# Altium footprint library USB.PcbLib: 25 footprints (part 1 of 2)
Each footprint in its own frame and in the unit in brackets; x right, y up, seen from the top. Pads: shape width x height; smd on the part's side, far side on the other; paste and mask are expansions set on the pad; w line width, h text height; cw(c..) or ccw(c..) is an arc to the next point about the centre after c.
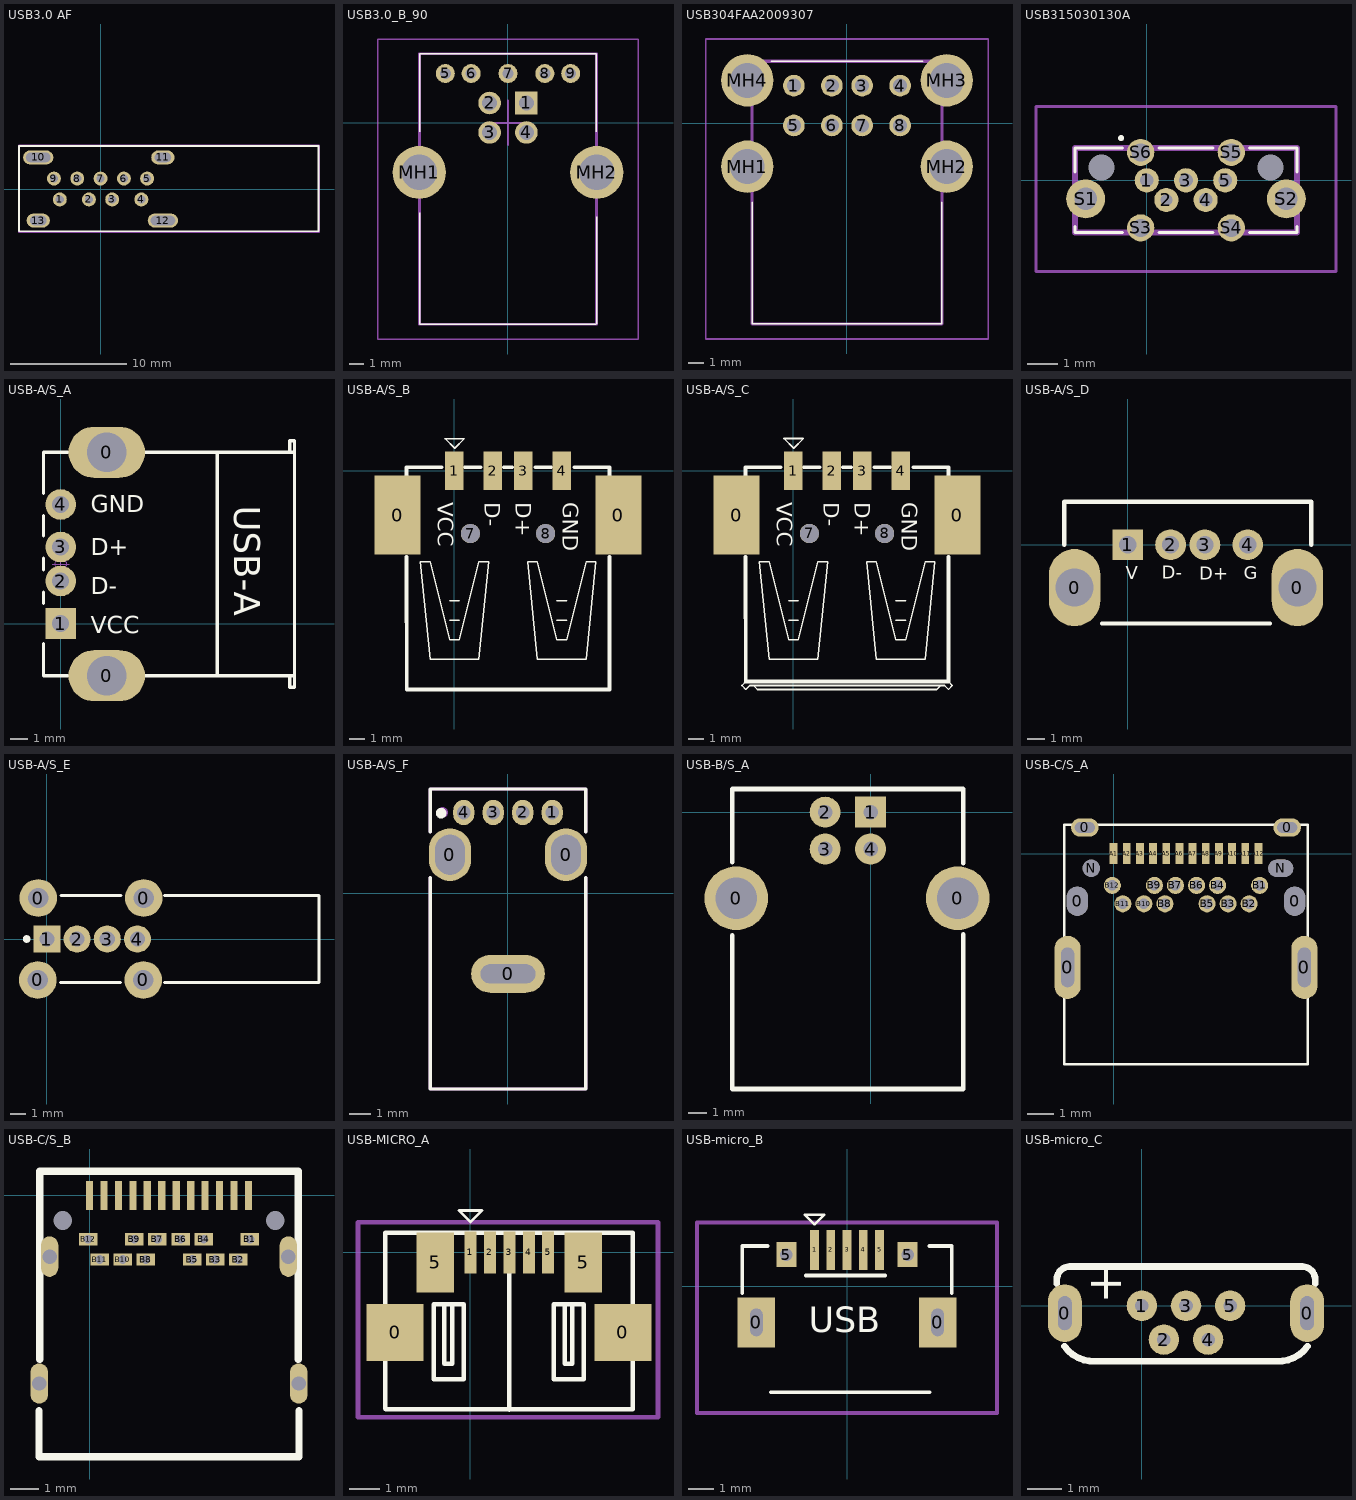
[diagram p0: the footprints below, top view; thin cyan lines are the x and y axes]

## USB3.0 AF [mm]
pads (13):
  round 1.2 hole 0.7: 1(-3.5,-0.9) 2(-1,-0.9) 3(1,-0.9) 4(3.5,-0.9) 5(4,0.9) 6(2,0.9) 7(0,0.9) 8(-2,0.9) 9(-4,0.9)
  oval 2.6x1.2 hole 0.8 slot 2.1 at 0 deg: 10(-5.35,2.71) 12(5.35,-2.71)
  oval 2x1.2 hole 0.8 slot 1.4 at 0 deg: 11(5.35,2.71) 13(-5.35,-2.71)
Top Overlay:
  lines w0.152: -7,-3.62 -7,3.7 18.7,3.7 18.7,-3.62 -7,-3.62
Top Designator (Mech15):
  lines w0.152: -7,-3.683 -7,3.75 18.75,3.75 18.75,-3.683 -7,-3.683
  text "'.Designator'" at -3.683,-0.508 h1.52
3D body "usb_3_a_90_v.stp": height 14, standoff -4.21, extent -7.05,-3.62 18.65,3.7

## USB3.0_B_90 [mm] "USB3.0 B型母座 蓝色 铜壳 弯脚 90度"
pads (11):
  rect 1.53x1.53 hole 1.02: 1(1.25,1.355)
  round 1.53 hole 1.02: 2(-1.25,1.355) 3(-1.25,-0.645) 4(1.25,-0.645)
  round 1.286 hole 0.75: 5(-4.25,3.355) 6(-2.5,3.355) 7(0,3.355) 8(2.5,3.355) 9(4.25,3.355)
  round 3.6 hole 2.4: MH1(-6.02,-3.355) MH2(6.02,-3.355)
Top Overlay:
  lines w0.1: -6,-13.655 6,-13.655 -6,-13.655 ; -6,-13.655 -6,-6.105 -6,-13.655 ; -6,4.695 -6,-0.605 -6,4.695 ; -6,4.695 6,4.695 ; -6,4.695 6,4.695 ; 6,4.695 6,-0.605 6,4.695 ; 6.02,-13.605 6.02,-6.355 6.02,-13.605
Top Component Outline:
  lines w0.2: -6,-13.655 6,-13.655 6,4.695 -6,4.695 -6,-13.655
Top Component Center:
  lines w0.152: -1.5,0 1.5,0 ; 0,-1.5 0,1.5
Top Value:
  text "'.Comment'" at -4.385,-0.591 h2.03
Top Designator:
  text "'.Designator'" at -5.815,-0.425 h2.03
Bottom Courtyard:
  lines w0.1: -8.82,-14.655 8.82,-14.655 8.82,5.695 -8.82,5.695 -8.82,-14.655
3D body "USB3.0-typeB.STEP": height 13.06, standoff -3.92, extent -6.35,-13.62 6.25,4.73

## USB304FAA2009307 [mm]
pads (12):
  round 1.431 hole 0.92: 1(-3.5,2.49) 2(-1,2.49) 3(1,2.49) 4(3.5,2.49) 5(-3.5,-0.13) 6(-1,-0.13) 7(1,-0.13) 8(3.5,-0.13)
  round 3.45 hole 2.3: MH1(-6.57,-2.84) MH2(6.57,-2.84) MH3(6.57,2.84) MH4(-6.57,2.84)
Top Overlay:
  lines w0.1: -6.25,-5.2 -6.25,-13.2 6.25,-13.2 6.25,-5.2 ; -5,4.1 5,4.1
Body Extra:
  lines w0.2: -6.25,-13.2 6.25,-13.2 6.25,4.1 -6.25,4.1 -6.25,-13.2
Top Designator (Mech15):
  lines w0.1: -9.295,-14.2 9.295,-14.2 9.295,5.565 -9.295,5.565 -9.295,-14.2
  text "'.Designator'" at -4.5,-4.5 h1.52
3D body "USB AF 双层 DIP.stp": height 15.6, standoff -3.8, extent -7.906,-13.602 7.794,3.996

## USB315030130A [mm]
pads (13):
  round 0.8 hole 0.45: 1(0,0) 3(1.3,0) 4(1.95,-0.65) 5(2.6,0)
  round 0.8 hole 0.4: 2(0.65,-0.65)
  round 0.425 hole 0.85 unplated: MH1(-1.5,0.425) MH2(4.1,0.425)
  round 1.286 hole 0.75: S1(-2.025,-0.615) S2(4.625,-0.615)
  round 0.9 hole 0.6: S3(-0.2,-1.575) S4(2.8,-1.575) S5(2.8,0.925) S6(-0.2,0.925)
Top Overlay:
  lines w0.1: -2.375,-1.525 -2.375,-1.725 -0.8,-1.725 ; -2.375,0.275 -2.375,1.075 -0.8,1.075 ; 0.4,-1.725 2.2,-1.725 ; 0.4,1.075 2.2,1.075 ; 3.4,-1.725 4.975,-1.725 4.975,-1.525 ; 3.4,1.075 4.975,1.075 4.975,0.275 ; -0.9,1.4 ccw(c-0.85,1.4) -0.8,1.4 ccw(c-0.85,1.4) -0.9,1.4
Body Extra:
  lines w0.2: -2.375,-1.725 -2.375,1.075 4.975,1.075 4.975,-1.725 -2.375,-1.725
Top Designator (Mech15):
  lines w0.1: -3.668,-3.025 -3.668,2.45 6.268,2.45 6.268,-3.025 -3.668,-3.025
3D body "USB3150-30-075-AMicroUSB 公头.stp": height 7.5, standoff -0.88, extent -2.375,-1.784 4.975,1.016

## USB-A/S_A [mm]
height 7.01
pads (6):
  oval 4.5x3 hole 2.3: 0(2.71,-3.07) 0(2.71,10.07)
  rect 1.8x1.8 hole 1: 1(0,0)
  round 1.8 hole 1: 2(0,2.5) 3(0,4.5) 4(0,7)
Top Overlay:
  lines w0.2: -1.01,-1.2 -1.01,-3.065 0.41,-3.065 ; -1.01,1.2 -1.01,1.84 ; -1.01,3.16 -1.01,3.84 ; -1.01,5.16 -1.01,6.34 ; -1.01,7.66 -1.01,10.065 0.41,10.065 ; 5.01,-3.065 13.752,-3.065 ; 5.01,10.065 13.752,10.065 ; 13.462,-3.065 13.462,-3.75 13.752,-3.75 13.752,10.75 13.462,10.75 13.462,10.065
  lines w0.203: 9.21,-3.065 9.21,10.065
  text "GND" at 1.778,6.548 h1.02
  text "D+" at 1.778,4.008 h1.02
  text "D-" at 1.778,1.722 h1.02
  text "VCC" at 1.778,-0.564 h1.02
  text "USB-A" at 10.21,6.93 h1.52
Top Designator (Mech15):
  circle w0.05: c0,3.5 r0.35
  lines w0.05: -0.5,3.5 0.5,3.5 ; 0,3 0,4
3D body "USB-A_SA.STEP": height 6.8, standoff -4.31, extent -0.548,-3.81 13.756,10.874

## USB-A/S_B [mm]
pads (8):
  rect 3x5.15 smd: 0(-3.7,-2.9) 0(10.7,-2.9)
  rect 1.2x2.5 smd: 1(0,0) 2(2.5,0) 3(4.5,0) 4(7,0)
  round 1.25 hole 1.25 unplated: 7(1.05,-4.1) 8(5.95,-4.1)
Top Overlay:
  lines w0.1: -0.303,-9.749 0.332,-9.749 ; -0.303,-8.479 0.332,-8.479 ; 6.682,-9.749 7.317,-9.749 ; 6.682,-8.479 7.317,-8.479 ; -2.208,-5.939 -1.573,-12.289 1.602,-12.289 2.237,-5.939 1.602,-5.939 0.332,-11.019 -0.303,-11.019 -1.573,-5.939 -2.208,-5.939 ; -0.613,2.09 0.022,1.455 0.657,2.09 -0.613,2.09 ; 4.777,-5.939 5.412,-12.289 8.587,-12.289 9.222,-5.939 8.587,-5.939 7.317,-11.019 6.682,-11.019 5.412,-5.939 4.777,-5.939
  lines w0.254: -3.104,-5.624 -3.097,-14.26 10.111,-14.26 10.104,-5.624 ; -3.104,-0.29 -3.104,0.218 -0.818,0.218 ; 0.706,0.218 1.722,0.218 ; 3.246,0.218 3.754,0.218 ; 5.278,0.218 6.294,0.218 ; 7.818,0.218 10.111,0.218 10.104,-0.29
  text "GND" at 7.056,-2.068 h1.02
  text "D+" at 4.008,-2.068 h1.02
  text "D-" at 1.976,-2.068 h1.02
  text "VCC" at -1.072,-2.068 h1.02
3D body "USB-A_S-B.STEP": height 6.9, standoff -0.55, extent -4.321,-13.97 11.179,0.73

## USB-A/S_C [mm]
pads (8):
  rect 3x5.15 smd: 0(-3.7,-2.9) 0(10.7,-2.9)
  rect 1.2x2.5 smd: 1(0,0) 2(2.5,0) 3(4.5,0) 4(7,0)
  round 1.25 hole 1.25 unplated: 7(1.05,-4.1) 8(5.95,-4.1)
Top Overlay:
  lines w0.1: -3.097,-13.752 -3.351,-14.006 -3.097,-14.26 -2.843,-14.006 -2.589,-14.006 ; -0.303,-9.749 0.332,-9.749 ; -0.303,-8.479 0.332,-8.479 ; 6.682,-9.749 7.317,-9.749 ; 6.682,-8.479 7.317,-8.479 ; 10.111,-13.752 10.365,-14.006 10.111,-14.26 9.857,-14.006 9.603,-14.006 ; -2.589,-14.006 -2.335,-14.266 9.349,-14.266 9.603,-14.006 ; -2.589,-14.006 9.603,-14.006 ; -2.208,-5.939 -1.573,-12.289 1.602,-12.289 2.237,-5.939 1.602,-5.939 0.332,-11.019 -0.303,-11.019 -1.573,-5.939 -2.208,-5.939 ; -0.613,2.09 0.022,1.455 0.657,2.09 -0.613,2.09 ; 4.777,-5.939 5.412,-12.289 8.587,-12.289 9.222,-5.939 8.587,-5.939 7.317,-11.019 6.682,-11.019 5.412,-5.939 4.777,-5.939
  lines w0.254: -3.104,-5.624 -3.097,-13.752 10.111,-13.752 10.104,-5.624 ; -3.104,-0.29 -3.104,0.218 -0.818,0.218 ; 0.706,0.218 1.722,0.218 ; 3.246,0.218 3.754,0.218 ; 5.278,0.218 6.294,0.218 ; 7.818,0.218 10.111,0.218 10.104,-0.29
  text "GND" at 7.056,-2.068 h1.02
  text "D+" at 4.008,-2.068 h1.02
  text "D-" at 1.976,-2.068 h1.02
  text "VCC" at -1.072,-2.068 h1.02
3D body "USB-A_S-C.STEP": height 7.4, standoff -0.55, extent -4.321,-14.192 11.179,0.508

## USB-A/S_D [mm]
pads (6):
  oval 3x4.5 hole 2.2: 0(-3.1,-2.5) 0(9.9,-2.5)
  rect 1.8x1.8 hole 1: 1(0,0)
  round 1.8 hole 1: 2(2.5,0) 3(4.5,0) 4(7,0)
Top Overlay:
  lines w0.254: -3.7,0 -3.7,2.5 10.7,2.5 10.7,0 ; -1.5,-4.6 8.3,-4.6
  text "D-" at 1.996,-1.981 h0.76
  text "D+" at 4.181,-2.032 h0.76
  text "G" at 6.771,-2.007 h0.76
  text "V" at -0.112,-2.007 h0.76
Board Outline:
  lines w0.254: -0.2,-0.2 cw(c0,-0.2) 0,0
3D body "USB-A_S-D.STEP": height 14, standoff -4, extent -3.644,-4.587 10.756,2.413

## USB-A/S_E [mm]
pads (8):
  round 2.5 hole 1.35: 0(-0.607,-2.718) 0(-0.581,2.718) 0(6.393,-2.718) 0(6.419,2.718)
  rect 1.8x1.8 hole 1: 1(0,0)
  round 1.8 hole 1: 2(2,0) 3(4,0) 4(6,0)
Top Overlay:
  circle w0.25: c-1.35,0 r0.125
  lines w0.2: 0.91,-2.878 4.876,-2.878 ; 0.936,2.878 4.902,2.878 ; 7.787,-2.88 18.052,-2.88 18.052,2.88 7.787,2.88

## USB-A/S_F [mm]
pads (7):
  oval 2x2.5 hole 1.4 slot 1.9 at 90 deg: 0(-2.75,1.825) 0(2.75,1.825)
  oval 3.5x1.8 hole 0.9 slot 2.6 at 0 deg: 0(0,-3.825)
  oval 1x1.2 hole 0.65: 1(2.1,3.825) 2(0.7,3.825) 3(-0.7,3.825) 4(-2.1,3.825)
Top Overlay:
  circle w0.25: c-3.173,3.795 r0.125
  lines w0.152: -3.683,0.747 -3.683,-9.286 3.683,-9.286 3.683,0.747 ; -3.683,2.906 -3.683,4.938 3.683,4.938 3.683,2.906
Top Designator (Mech15):
  circle w0.25: c-3.1,3.825 r0.125
  lines w0.152: -3.683,0.747 -3.683,-9.286 3.683,-9.286 3.683,0.747 ; -3.683,2.906 -3.683,4.938 3.683,4.938 3.683,2.906
  text "'.Designator'" at -5.783,-2.144 h1.02
3D body "USB-A_S-F.STEP": height 13.7, standoff -3.05, extent -3.632,-9.271 3.488,4.729

## USB-B/S_A [mm]
height 1.1
pads (6):
  round 3.5 hole 2.3: 0(-7.391,-4.742) 0(4.801,-4.742)
  rect 1.7x1.7 hole 0.8: 1(0,0)
  round 1.7 hole 0.8: 2(-2.5,0) 3(-2.5,-2.032) 4(0,-2.032)
Top Overlay:
  lines w0.254: -7.6,-6.769 -7.6,-15.24 5.1,-15.24 5.1,-6.718 ; -7.6,-2.756 -7.6,1.27 5.1,1.27 5.1,-2.807
3D body "USB-B_S-A.STEP": height 11.45, standoff -2.95, extent -8.004,-15.262 5.715,1.038

## USB-C/S_A [mm]
pads (32):
  oval 1x2.4 hole 0.5 slot 1.5 at 90 deg: 0(-1.75,-4.325) 0(7.25,-4.325)
  oval 0.8x1.1 hole 0.8 slot 1.1 at 90 deg: 0(-1.38,-1.81) 0(6.88,-1.81)
  oval 1.05x0.7 hole 0.4 slot 0.75 at 0 deg: 0(-1.095,0.99) 0(6.595,0.99)
  rect 0.3x0.8 smd: A1(0,0) A2(0.5,0) A3(1,0) A4(1.5,0) A5(2,0) A6(2.5,0) A7(3,0) A8(3.5,0) A9(4,0) A10(4.5,0) A11(5,0) A12(5.5,0)
  round 0.65 hole 0.4: B1(5.55,-1.21) B2(5.15,-1.91) B3(4.35,-1.91) B4(3.95,-1.21) B5(3.55,-1.91) B6(3.15,-1.21) B7(2.35,-1.21) B8(1.95,-1.91) B9(1.55,-1.21) B10(1.15,-1.91) B11(0.35,-1.91) B12(-0.05,-1.21)
  round 0.65 hole 0.65: N(-0.85,-0.56)
  oval 0.95x0.65 hole 0.65 slot 0.95 at 0 deg: N(6.35,-0.56)
Top Overlay:
  lines w0.1: -1.875,-8.01 7.375,-8.01 7.375,1.09 -1.875,1.09 -1.875,-8.01

## USB-C/S_B [mm]
pads (30):
  rect 0.25x1 smd: A1(0,0) A2(0.5,0) A3(1,0) A4(1.5,0) A5(2,0) A6(2.5,0) A7(3,0) A8(3.5,0) A9(4,0) A10(4.5,0) A11(5,0) A12(5.5,0)
  rect 0.64x0.42 hole 0.3: B1(5.55,-1.517) B2(5.15,-2.217) B3(4.35,-2.217) B4(3.95,-1.517) B5(3.55,-2.217) B6(3.15,-1.517) B7(2.35,-1.517) B8(1.95,-2.217) B9(1.55,-1.517) B10(1.15,-2.217) B11(0.35,-2.217) B12(-0.05,-1.517)
  oval 0.6x1.4 hole 0.5: ""(-1.74,-6.507) ""(-1.38,-2.117) ""(6.88,-2.117) ""(7.24,-6.507)
  round 0 hole 0.65: ""(-0.925,-0.867) ""(6.425,-0.867)
Top Overlay:
  lines w0.254: -1.75,-7.453 -1.75,-9.037 7.25,-9.037 7.25,-7.453 ; -1.725,-5.667 -1.725,0.833 7.225,0.833 7.225,-5.667

## USB-MICRO_A [mm]
pads (9):
  rect 1.9x1.9 smd: 0(-2.515,-2.667) 0(5.08,-2.667)
  rect 0.4x1.4 smd: 1(0,0) 2(0.648,0) 3(1.295,0) 4(1.943,0) 5(2.591,0)
  rect 1.25x2 smd: 5(-1.168,-0.33) 5(3.759,-0.33)
Top Overlay:
  lines w0.1: -0.381,1.397 0.381,1.397 0,1.016 -0.381,1.397
  lines w0.152: -2.845,-5.207 -2.845,0.66 ; -2.819,-5.232 5.385,-5.232 ; -2.794,0.66 5.385,0.66 ; -0.869,-1.728 -0.869,-3.713 -0.666,-3.713 -0.615,-3.713 -0.615,-1.728 ; 1.296,-5.244 1.296,0.635 ; 3.144,-1.728 3.144,-3.713 3.398,-3.713 3.398,-1.728 ; 5.41,-5.232 5.41,0.66 ; -1.23,-4.227 -0.23,-4.227 -0.23,-1.728 -1.23,-1.728 -1.23,-4.227 ; 2.77,-4.227 2.77,-1.728 3.77,-1.728 3.77,-4.227 2.77,-4.227
Top Designator (Mech15):
  lines w0.152: -3.75,-5.5 6.25,-5.5 6.25,1 -3.75,1 -3.75,-5.5
  text "'.Designator'" at -2.75,-3 h1.52
3D body "USB-MICRO_A.STEP": height 2.69, standoff -0.24, extent -2.712,-5.08 5.252,0.342

## USB-micro_B [mm]
pads (9):
  rect 1.5x2 hole 0.5 slot 1.1 at 90 deg: 0(-3.625,-1.45) 0(3.625,-1.45)
  rect 0.35x1.6 smd: 1(-1.3,1.45) 2(-0.65,1.45) 3(0,1.45) 4(0.65,1.45) 5(1.3,1.45)
  rect 0.8x1 hole 0.5: 5(-2.425,1.26) 5(2.425,1.26)
Top Overlay:
  lines w0.1: -1.681,2.847 -1.3,2.466 -0.919,2.847 -1.681,2.847
  lines w0.152: -4.191,-0.282 -4.191,1.598 -3.175,1.598 ; -3.048,-4.244 3.302,-4.244 ; -1.65,0.425 1.525,0.425 ; 3.302,1.598 4.191,1.598 4.191,-0.282
  text "USB" at -1.524,-1.852 h1.02
Top Designator (Mech15):
  lines w0.152: -6,-5.08 6,-5.08 6,2.54 -6,2.54 -6,-5.08
  text "'.Designator'" at -4,-1.75 h1.52
3D body "USB-MICRO_B.STEP": height 2.8, standoff -0.95, extent -4.001,-4.15 4.001,1.45

## USB-micro_C [mm]
pads (7):
  oval 1x1.7 hole 0.4 slot 1 at 90 deg: 0(-2.275,-0.22) 0(4.875,-0.22)
  round 0.9 hole 0.4: 1(0,0) 2(0.65,-1) 3(1.3,0) 4(1.95,-1) 5(2.6,0)
Top Overlay:
  lines w0.2: -2.51,0.643 -2.51,0.77 cw(c-2.129,0.77) -2.129,1.151 -1.875,1.151 -1.494,1.151 4.094,1.151 4.475,1.151 4.729,1.151 cw(c4.729,0.77) 5.11,0.77 5.11,0.643 ; -2.287,-1.197 ccw(c-1.418,-0.576) -1.367,-1.643 ; -1.329,-1.643 -1.113,-1.643 3.713,-1.643 3.967,-1.643 ccw(c4.018,-0.576) 4.887,-1.197
  text "+" at -0.605,0.059 h1.02
3D body "USB-MICRO_C.STEP": height 5.65, standoff -1.55, extent -2.668,-1.741 5.334,1.233